# Altium footprint library daughter_board.PcbLib: 10 footprints
Each footprint in its own frame and in the unit in brackets; x right, y up, seen from the top. Pads: shape width x height; smd on the part's side, far side on the other; paste and mask are expansions set on the pad; w line width, h text height; cw(c..) or ccw(c..) is an arc to the next point about the centre after c.
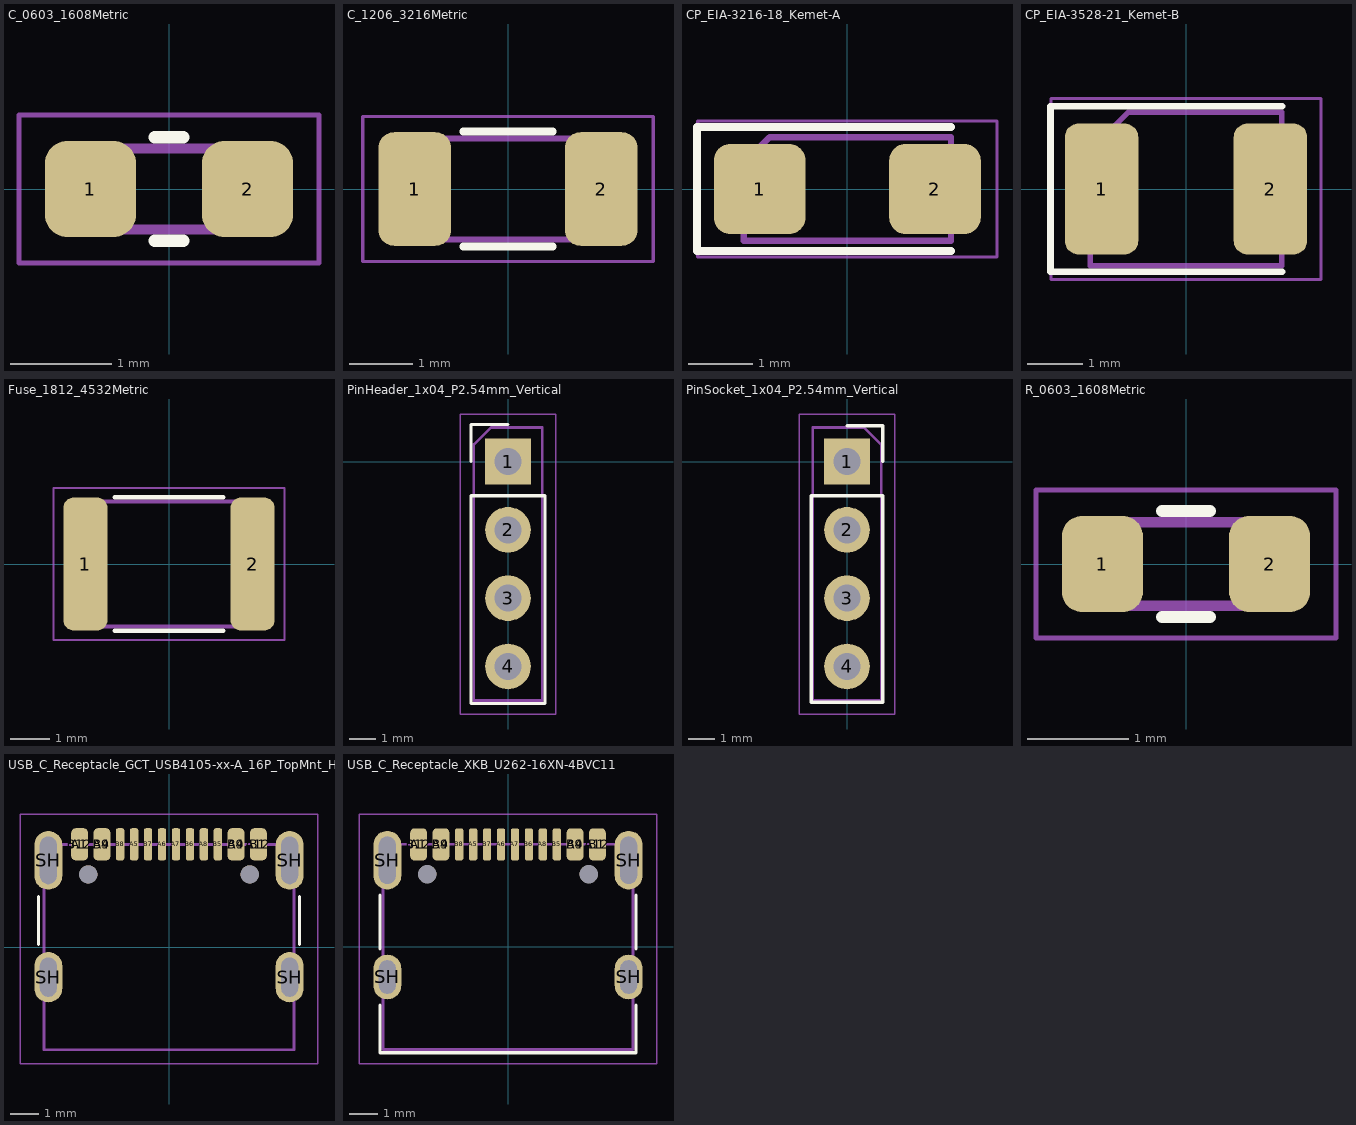
[diagram p0: the footprints below, top view; thin cyan lines are the x and y axes]

## C_0603_1608Metric [mm] "Capacitor SMD 0603 (1608 Metric), square (rectangular) end terminal, IPC-7351 nominal, (Body size source: IPC-SM-782 page 76, https://www.pcb-3d.com/wordpress/wp-content/uploads/ipc-sm-782a_amendment_"
pads (2):
  rrect50% 0.9x0.95 smd: 1(-0.775,0) 2(0.775,0)
Top Overlay:
  lines w0.12: -0.141,-0.51 0.141,-0.51 ; -0.141,0.51 0.141,0.51
Mechanical 13:
  lines w0.1: -0.8,-0.4 0.8,-0.4 0.8,0.4 -0.8,0.4 -0.8,-0.4
Mechanical 15:
  lines w0.05: -1.48,-0.73 1.48,-0.73 1.48,0.73 -1.48,0.73 -1.48,-0.73
3D body "C_0603_1608Metric.step": height 0.8, standoff 0, extent -0.8,-0.4 0.8,0.4

## C_1206_3216Metric [mm] "Capacitor SMD 1206 (3216 Metric), square (rectangular) end terminal, IPC-7351 nominal, (Body size source: IPC-SM-782 page 76, https://www.pcb-3d.com/wordpress/wp-content/uploads/ipc-sm-782a_amendment_"
pads (2):
  rrect43% 1.15x1.8 smd: 1(-1.475,0) 2(1.475,0)
Top Overlay:
  lines w0.12: -0.711,-0.91 0.711,-0.91 ; -0.711,0.91 0.711,0.91
Mechanical 13:
  lines w0.1: -1.6,-0.8 1.6,-0.8 1.6,0.8 -1.6,0.8 -1.6,-0.8
Mechanical 15:
  lines w0.05: -2.3,-1.15 2.3,-1.15 2.3,1.15 -2.3,1.15 -2.3,-1.15
3D body "C_1206_3216Metric.step": height 1.6, standoff 0, extent -1.6,-0.8 1.6,0.8

## CP_EIA-3216-18_Kemet-A [mm] "Tantalum Capacitor SMD Kemet-A (3216-18 Metric), IPC-7352 nominal, (Body size from: http://www.kemet.com/Lists/ProductCatalog/Attachments/253/KEM_TC101_STD.pdf)"
pads (2):
  rrect36% 1.415x1.39 smd: 1(-1.352,0) 2(1.352,0)
Top Overlay:
  lines w0.12: 1.6,-0.955 -2.32,-0.955 -2.32,0.955 1.6,0.955
Mechanical 13:
  lines w0.1: -1.6,-0.8 -1.6,0.4 -1.2,0.8 1.6,0.8 1.6,-0.8 -1.6,-0.8
Mechanical 15:
  lines w0.05: -2.31,-1.05 2.31,-1.05 2.31,1.05 -2.31,1.05 -2.31,-1.05
3D body "CP_EIA-3216-18_Kemet-A.step": height 1.8, standoff 0, extent -1.6,-0.8 1.6,0.8

## CP_EIA-3528-21_Kemet-B [mm] "Tantalum Capacitor SMD Kemet-B (3528-21 Metric), IPC-7352 nominal, (Body size from: http://www.kemet.com/Lists/ProductCatalog/Attachments/253/KEM_TC101_STD.pdf)"
pads (2):
  rrect37% 1.34x2.39 smd: 1(-1.54,0) 2(1.54,0)
Top Overlay:
  lines w0.12: 1.75,-1.51 -2.47,-1.51 -2.47,1.51 1.75,1.51
Mechanical 13:
  lines w0.1: -1.75,-1.4 -1.75,0.7 -1.05,1.4 1.75,1.4 1.75,-1.4 -1.75,-1.4
Mechanical 15:
  lines w0.05: -2.46,-1.65 2.46,-1.65 2.46,1.65 -2.46,1.65 -2.46,-1.65
3D body "CP_EIA-3528-21_Kemet-B.step": height 2.1, standoff 0, extent -1.75,-1.4 1.75,1.4

## Fuse_1812_4532Metric [mm] "Fuse SMD 1812 (4532 Metric), square (rectangular) end terminal, IPC-7351 nominal, (Body size source: https://www.nikhef.nl/pub/departments/mt/projects/detectorR_D/dtddice/ERJ2G.pdf)"
pads (2):
  rrect44% 1.125x3.4 smd: 1(-2.137,0) 2(2.137,0)
Top Overlay:
  lines w0.12: -1.386,-1.71 1.386,-1.71 ; -1.386,1.71 1.386,1.71
Mechanical 13:
  lines w0.1: -2.25,-1.6 2.25,-1.6 2.25,1.6 -2.25,1.6 -2.25,-1.6
Mechanical 15:
  lines w0.05: -2.95,-1.95 2.95,-1.95 2.95,1.95 -2.95,1.95 -2.95,-1.95
3D body "R_1812_4532Metric.step": height 0.6, standoff 0, extent -2.25,-1.6 2.25,1.6

## PinHeader_1x04_P2.54mm_Vertical [mm] "Through hole straight pin header, 1x04, 2.54mm pitch, single row"
pads (4):
  rect 1.7x1.7 hole 1: 1(0,0)
  round 1.7 hole 1: 2(0,-2.54) 3(0,-5.08) 4(0,-7.62)
Top Overlay:
  lines w0.12: -1.38,0 -1.38,1.38 0,1.38 ; -1.38,-9 -1.38,-1.27 1.38,-1.27 1.38,-9 -1.38,-9
Mechanical 13:
  lines w0.1: -1.27,-8.89 -1.27,0.635 -0.635,1.27 1.27,1.27 1.27,-8.89 -1.27,-8.89
Mechanical 15:
  lines w0.05: -1.77,-9.39 1.77,-9.39 1.77,1.77 -1.77,1.77 -1.77,-9.39
3D body "PinHeader_1x04_P2.54mm_Vertical.step": height 8.54, standoff -3, extent -1.27,-8.89 1.27,1.27

## PinSocket_1x04_P2.54mm_Vertical [mm] "Through hole straight socket strip, 1x04, 2.54mm pitch, single row (from Kicad 4.0.7), script generated"
pads (4):
  rect 1.7x1.7 hole 1: 1(0,0)
  round 1.7 hole 1: 2(0,-2.54) 3(0,-5.08) 4(0,-7.62)
Top Overlay:
  lines w0.12: 0,1.33 1.33,1.33 1.33,0 ; -1.33,-8.95 -1.33,-1.27 1.33,-1.27 1.33,-8.95 -1.33,-8.95
Mechanical 13:
  lines w0.1: -1.27,-8.89 -1.27,1.27 0.635,1.27 1.27,0.635 1.27,-8.89 -1.27,-8.89
Mechanical 15:
  lines w0.05: -1.77,-9.39 -1.77,1.77 1.77,1.77 1.77,-9.39 -1.77,-9.39
3D body "PinSocket_1x04_P2.54mm_Vertical.step": height 8.5, standoff -3.1, extent -1.27,-8.89 1.27,1.27

## R_0603_1608Metric [mm] "Resistor SMD 0603 (1608 Metric), square (rectangular) end terminal, IPC-7351 nominal, (Body size source: IPC-SM-782 page 72, https://www.pcb-3d.com/wordpress/wp-content/uploads/ipc-sm-782a_amendment_1"
pads (2):
  rrect50% 0.8x0.95 smd: 1(-0.825,0) 2(0.825,0)
Top Overlay:
  lines w0.12: -0.237,-0.523 0.237,-0.523 ; -0.237,0.523 0.237,0.523
Mechanical 13:
  lines w0.1: -0.8,-0.413 0.8,-0.413 0.8,0.413 -0.8,0.413 -0.8,-0.413
Mechanical 15:
  lines w0.05: -1.48,-0.73 1.48,-0.73 1.48,0.73 -1.48,0.73 -1.48,-0.73
3D body "R_0603_1608Metric.step": height 0.45, standoff 0, extent -0.8,-0.4 0.8,0.4

## USB_C_Receptacle_GCT_USB4105-xx-A_16P_TopMnt_Horizontal [mm] "USB 2.0 Type C Receptacle, GCT, 16P, top mounted, horizontal, 5A: https://gct.co/files/drawings/usb4105.pdf"
pads (22):
  rrect50% 0.6x1.15 smd: A1(-3.2,3.68) A4(-2.4,3.68) A9(2.4,3.68) A12(3.2,3.68) B1(3.2,3.68) B4(2.4,3.68) B9(-2.4,3.68) B12(-3.2,3.68)
  rrect50% 0.3x1.15 smd: A5(-1.25,3.68) A6(-0.25,3.68) A7(0.25,3.68) A8(1.25,3.68) B5(1.75,3.68) B6(0.75,3.68) B7(-0.75,3.68) B8(-1.75,3.68)
  oval 1x1.8 hole 0.6 slot 1.4 at 90 deg: SH(-4.32,-1.075) SH(4.32,-1.075)
  oval 1x2.1 hole 0.6 slot 1.7 at 90 deg: SH(-4.32,3.105) SH(4.32,3.105)
  round 0.65 hole 0.65 unplated: ""(-2.89,2.605) ""(2.89,2.605)
Top Overlay:
  lines w0.12: -4.67,0.1 -4.67,1.8 ; 4.67,0.1 4.67,1.8
Mechanical 13:
  lines w0.1: -4.47,-3.675 4.47,-3.675 4.47,3.675 -4.47,3.675 -4.47,-3.675
Mechanical 15:
  lines w0.05: -5.32,-4.18 5.32,-4.18 5.32,4.76 -5.32,4.76 -5.32,-4.18
3D body "USB_C_Receptacle_GCT_USB4105-xx-A_16P_TopMnt_Horizontal.step": height 3.31, standoff -0.95, extent -4.47,-3.675 4.47,4.105

## USB_C_Receptacle_XKB_U262-16XN-4BVC11 [mm] "USB Type C, right-angle, SMT, https://datasheet.lcsc.com/szlcsc/1811141824_XKB-Enterprise-U262-161N-4BVC11_C319148.pdf"
pads (22):
  rrect50% 0.6x1.15 smd: A1(-3.2,3.67) A4(-2.4,3.67) A9(2.4,3.67) A12(3.2,3.67) B1(3.2,3.67) B4(2.4,3.67) B9(-2.4,3.67) B12(-3.2,3.67)
  rrect50% 0.3x1.15 smd: A5(-1.25,3.67) A6(-0.25,3.67) A7(0.25,3.67) A8(1.25,3.67) B5(1.75,3.67) B6(0.75,3.67) B7(-0.75,3.67) B8(-1.75,3.67)
  oval 1x1.6 hole 0.6 slot 1.2 at 90 deg: SH(-4.32,-1.075) SH(4.32,-1.075)
  oval 1x2.1 hole 0.6 slot 1.7 at 90 deg: SH(-4.32,3.105) SH(4.32,3.105)
  round 0.65 hole 0.65 unplated: ""(-2.89,2.605) ""(2.89,2.605)
Top Overlay:
  lines w0.12: -4.58,-2.08 -4.58,-3.785 4.58,-3.785 4.58,-2.08 ; -4.58,-0.07 -4.58,1.85 ; 4.58,-0.07 4.58,1.85
Mechanical 13:
  lines w0.1: -4.47,-3.675 -4.47,3.675 4.47,3.675 4.47,-3.675 -4.47,-3.675
Mechanical 15:
  lines w0.05: -5.32,-4.18 -5.32,4.75 5.32,4.75 5.32,-4.18 -5.32,-4.18
3D body "USB_C_Receptacle_GCT_USB4105-xx-A_16P_TopMnt_Horizontal.step": height 3.31, standoff -0.95, extent -4.47,-3.675 4.47,4.105